# Altium integrated library AGC0402X7R250-103KNP.IntLib: 1 symbol
Pins are listed as number, name and electrical type; pins without a type are passive.

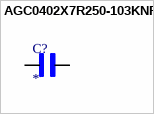
[diagram p0: symbol AGC0402X7R250-103KNP]

## AGC0402X7R250-103KNP
designator C?
MP: AGC0402X7R250-103KNP; Package: None; Price: None; Value: *; Availability: Unavailable
footprint CAPC1005X55N
pins: 1, 2